# Altium footprint library Components.PcbLib: 82 footprints (part 6 of 6)
Each footprint in its own frame and in the unit in brackets; x right, y up, seen from the top. Pads: shape width x height; smd on the part's side, far side on the other; paste and mask are expansions set on the pad; w line width, h text height; cw(c..) or ccw(c..) is an arc to the next point about the centre after c.
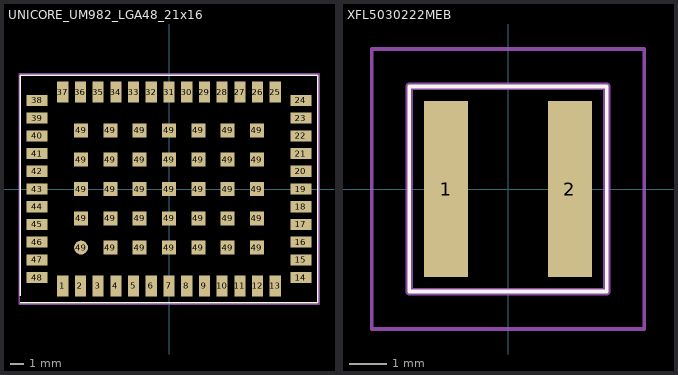
[diagram p5: the footprints below, top view; thin cyan lines are the x and y axes]

## UNICORE_UM982_LGA48_21x16 [mm] "Unicore UM982 GNSS module, LGA-48 + 35 GND pads, 21.0x16.0x2.6mm, per UM982 manual R1.8 Fig 3-4"
height 2.6
pads (83):
  rect 0.8x1.5 smd: 1(-7.62,-6.95) 2(-6.35,-6.95) 3(-5.08,-6.95) 4(-3.81,-6.95) 5(-2.54,-6.95) 6(-1.27,-6.95) 7(0,-6.95) 8(1.27,-6.95) 9(2.54,-6.95) 10(3.81,-6.95) 11(5.08,-6.95) 12(6.35,-6.95) 13(7.62,-6.95) 25(7.62,6.95) 26(6.35,6.95) 27(5.08,6.95) 28(3.81,6.95) 29(2.54,6.95) 30(1.27,6.95) 31(0,6.95) 32(-1.27,6.95) 33(-2.54,6.95) 34(-3.81,6.95) 35(-5.08,6.95) 36(-6.35,6.95) 37(-7.62,6.95)
  rect 1.5x0.8 smd: 14(9.45,-6.35) 15(9.45,-5.08) 16(9.45,-3.81) 17(9.45,-2.54) 18(9.45,-1.27) 19(9.45,0) 20(9.45,1.27) 21(9.45,2.54) 22(9.45,3.81) 23(9.45,5.08) 24(9.45,6.35) 38(-9.45,6.35) 39(-9.45,5.08) 40(-9.45,3.81) 41(-9.45,2.54) 42(-9.45,1.27) 43(-9.45,0) 44(-9.45,-1.27) 45(-9.45,-2.54) 46(-9.45,-3.81) 47(-9.45,-5.08) 48(-9.45,-6.35)
  round 1 smd: 49(-6.3,-4.2)
  rect 1x1 smd: 49(-6.3,-2.1) 49(-6.3,0) 49(-6.3,2.1) 49(-6.3,4.2) 49(-4.2,-4.2) 49(-4.2,-2.1) 49(-4.2,0) 49(-4.2,2.1) 49(-4.2,4.2) 49(-2.1,-4.2) 49(-2.1,-2.1) 49(-2.1,0) 49(-2.1,2.1) 49(-2.1,4.2) 49(0,-4.2) 49(0,-2.1) 49(0,0) 49(0,2.1) 49(0,4.2) 49(2.1,-4.2) 49(2.1,-2.1) 49(2.1,0) 49(2.1,2.1) 49(2.1,4.2) 49(4.2,-4.2) 49(4.2,-2.1) 49(4.2,0) 49(4.2,2.1) 49(4.2,4.2) 49(6.3,-4.2) 49(6.3,-2.1) 49(6.3,0) 49(6.3,2.1) 49(6.3,4.2)
Top Overlay:
  lines w0.1: -10.65,-8.15 10.65,-8.15 10.65,8.15 -10.65,8.15 -10.65,-7.65
Mechanical 15:
  lines w0.1: -10.75,-8.25 -10.75,8.25 10.75,8.25 10.75,-8.25 -10.75,-8.25
3D body: height 2.6, standoff 0, extent -10.5,-8 10.5,8

## XFL5030222MEB [mm]
pads (2):
  rect 1.18x4.7 smd: 1(-1.655,0) 2(1.655,0)
Top Overlay:
  lines w0.1: -2.64,-2.74 -2.64,2.74 2.64,2.74 2.64,-2.74 -2.64,-2.74
Mechanical 13:
  lines w0.2: -2.64,-2.74 -2.64,2.74 2.64,2.74 2.64,-2.74 -2.64,-2.74
Mechanical 15:
  lines w0.1: -3.64,-3.74 -3.64,3.74 3.64,3.74 3.64,-3.74 -3.64,-3.74
3D body "XFL5030-102MEB.stp": height 3.1, standoff 0, extent -2.64,-2.74 2.64,2.74